# Altium schematic symbol library 2019-12-02_11-33-34.SchLib: 2 symbols
Pins are listed as number, name and electrical type; pins without a type are passive.

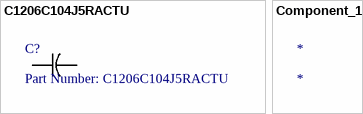
[diagram p0: symbols C1206C104J5RACTU to Component_1]

## C1206C104J5RACTU
designator C?, comment Part Number: C1206C104J5RACTU
No Description Available; Vendor: Kemet; Built_By: EMA_UL_Team; Type: DEV; Manufacturer_Part_Number: C1206C104J5RACTU; Copyright: Copyright (C) 2018 Accelerated Designs. All rights reserved; RefDes: RefDes; Value: Value
footprint CC1206N
pins: 1, 2

## Component_1
designator *